# Altium schematic symbol library STM32WB55VGY6TR.SchLib: 1 symbol
Pins are listed as number, name and electrical type; pins without a type are passive.

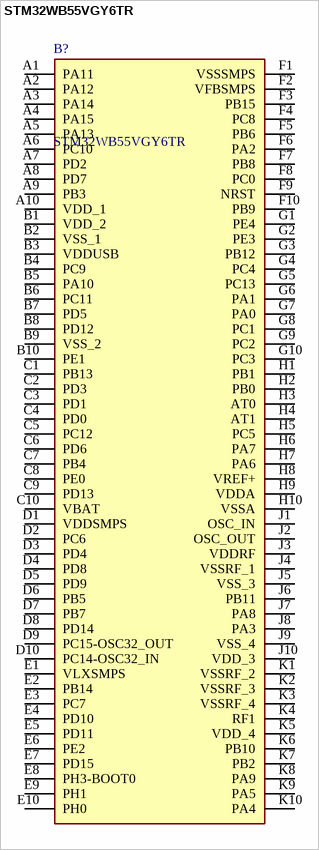
[diagram p0: symbol STM32WB55VGY6TR]

## STM32WB55VGY6TR
designator B?
Ultra-low-power dual core Arm Cortex-M4 MCU 64 MHz, Cortex-M0+ 32MHz with 1 Mbyte of Flash memory, Bluetooth 5, 802.15.4, USB, LCD, AES-256; Manufacturer_Name: STMicroelectronics; Geometry.Height: 0.59mm; Mouser Part Number: 511-STM32WB55VGY6TR; Mouser Price/Stock: https://www.mouser.co.uk/ProductDetail/STMicroelectronics/STM32WB55VGY6TR?qs=lYGu3FyN48e4iwYOkj%252BV4w%3D%3D; Manufacturer_Part_Number: STM32WB55VGY6TR; Datasheet Link: https://www.st.com/resource/en/datasheet/stm32wb55cc.pdf
footprint BGA100C40P10X10_440X438X59
pins: A1 PA11, A2 PA12, A3 PA14, A4 PA15, A5 PA13, A6 PC10, A7 PD2, A8 PD7, A9 PB3, A10 VDD_1, B1 VDD_2, B2 VSS_1, B3 VDDUSB, B4 PC9, B5 PA10, B6 PC11, B7 PD5, B8 PD12, B9 VSS_2, B10 PE1, C1 PB13, C2 PD3, C3 PD1, C4 PD0, C5 PC12, C6 PD6, C7 PB4, C8 PE0, C9 PD13, C10 VBAT, D1 VDDSMPS, D2 PC6, D3 PD4, D4 PD8, D5 PD9, D6 PB5, D7 PB7, D8 PD14, D9 PC15-OSC32_OUT, D10 PC14-OSC32_IN, E1 VLXSMPS, E2 PB14, E3 PC7, E4 PD10, E5 PD11, E6 PE2, E7 PD15, E8 PH3-BOOT0, E9 PH1, E10 PH0, F1 VSSSMPS, F2 VFBSMPS, F3 PB15, F4 PC8, F5 PB6, F6 PA2, F7 PB8, F8 PC0, F9 NRST, F10 PB9, G1 PE4, G2 PE3, G3 PB12, G4 PC4, G5 PC13, G6 PA1, G7 PA0, G8 PC1, G9 PC2, G10 PC3, H1 PB1, H2 PB0, H3 AT0, H4 AT1, H5 PC5, H6 PA7, H7 PA6, H8 VREF+, H9 VDDA, H10 VSSA, J1 OSC_IN, J2 OSC_OUT, J3 VDDRF, J4 VSSRF_1, J5 VSS_3, J6 PB11, J7 PA8, J8 PA3, J9 VSS_4, J10 VDD_3, K1 VSSRF_2, K2 VSSRF_3, K3 VSSRF_4, K4 RF1, K5 VDD_4, K6 PB10, K7 PB2, K8 PA9, K9 PA5, K10 PA4